# Altium schematic symbol library Thyristor.SchLib: 10 symbols
Pins are listed as number, name and electrical type; pins without a type are passive.

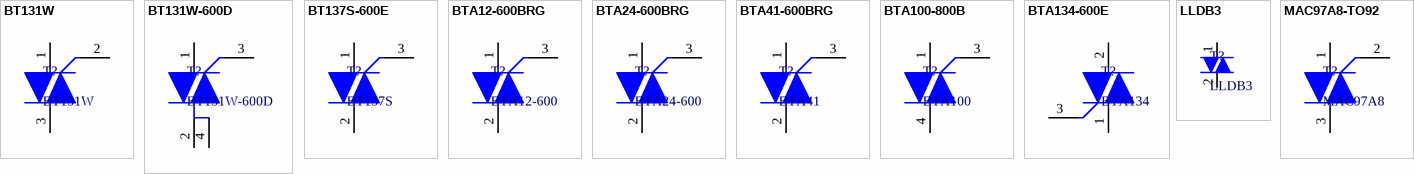
[diagram p0: symbols BT131W to MAC97A8-TO92]

## BT131W
designator T?
BT131W-800  SOT-223-2L; Code: N/A
footprint SOT-223- 2L
pins: 1 A1, 2 A2, 3 G

## BT131W-600D
designator T?
WEIDA BT131-600D (5mA 600V Two-way thyristor SOT-223-3L Thyristors (SCR)/Modules ROHS); Code: N/A
footprint SOT223-4N (SOT223, 4-Leads, Body 6.5x3.5mm, Pitch 2.3mm, Lead Span 7mm, IPC Medium Density)
pins: 1 A1, 2 A2, 3 G, 4 A2

## BT137S-600E
designator T?, comment BT137S
BT137S-600E, 600V, 8A; Designed by: nhox; Code: N/A
footprint TO-252 (KVU D-PAK, 3-Pads, Body 6,2x6,7mm (max), IPC Medium Density)
pins: 1 A1, 2 A2, 3 G

## BTA12-600BRG
designator T?, comment BTA12-600
TRIAC 600V 12A TO220AB; Code: 1802-011; Designed by: nhox; Value: BTA12-600
footprint QTO-220-sole (TO-220 - 1-2-3)
footprint QTO-220NH-SOLE (TO-220 - 1-2-3)
footprint QTO-220H3-sole (TO-220 1-2-3)
pins: 1 A1, 2 A2, 3 G

## BTA24-600BRG
designator T?, comment BTA24-600
TRIAC 600V 24A TO220AB; Code: 1802-010; Designed by: nhox; Value: BTA24-600
footprint QTO-220-sole (TO-220 - 1-2-3)
footprint QTO-220NH-SOLE (TO-220 - 1-2-3)
footprint QTO-220H3-sole (TO-220 1-2-3)
footprint QTO-220NH-2 (TO-220 - 1-2-3)
footprint QTO-220NH-3 (TO-220 - 1-2-3)
pins: 1 A1, 2 A2, 3 G

## BTA41-600BRG
designator T?, comment BTA41
BTA41-600BRG, Triacs 40 Amp 600 Volt, TOP-3; Designed by: nhox; Code: N/A
footprint TO-P3
pins: 1 A1, 2 A2, 3 G

## BTA100-800B
designator T?, comment BTA100
TRIAC 800V 100A TO4P, BTA100-800B; Code: 1802-010; Designed by: nhox
footprint TO-P4
pins: 1 A1, 3 G, 4 A2

## BTA134-600E
designator T?, comment BTA134
TRIAC SENS GATE 600V 4A SOT82-3; Value: BTA12-600; Code: N/A
footprint SOT - 82 (SOT - 82 - 1-2-3)
pins: 1 A1, 2 A2, 3 G

## LLDB3
designator T?
150mW Bi-directional Trigger Diode; Designed by: nhox; Code: N/A
footprint SOD80-BI (Bi-directional, DB3)
pins: 1 A1, 2 A2

## MAC97A8-TO92
designator T?, comment MAC97A8
TRIAC SENS GATE 600V 0.6A TO-92; Code: 1802-182; Value: BTA24-600
footprint QTO-92_2 (TO-92)
pins: 1 G, 2 A2, 3 A1